# Altium footprint library DSP扩展板.PcbLib: 16 footprints
Each footprint in its own frame and in the unit in brackets; x right, y up, seen from the top. Pads: shape width x height; smd on the part's side, far side on the other; paste and mask are expansions set on the pad; w line width, h text height; cw(c..) or ccw(c..) is an arc to the next point about the centre after c.
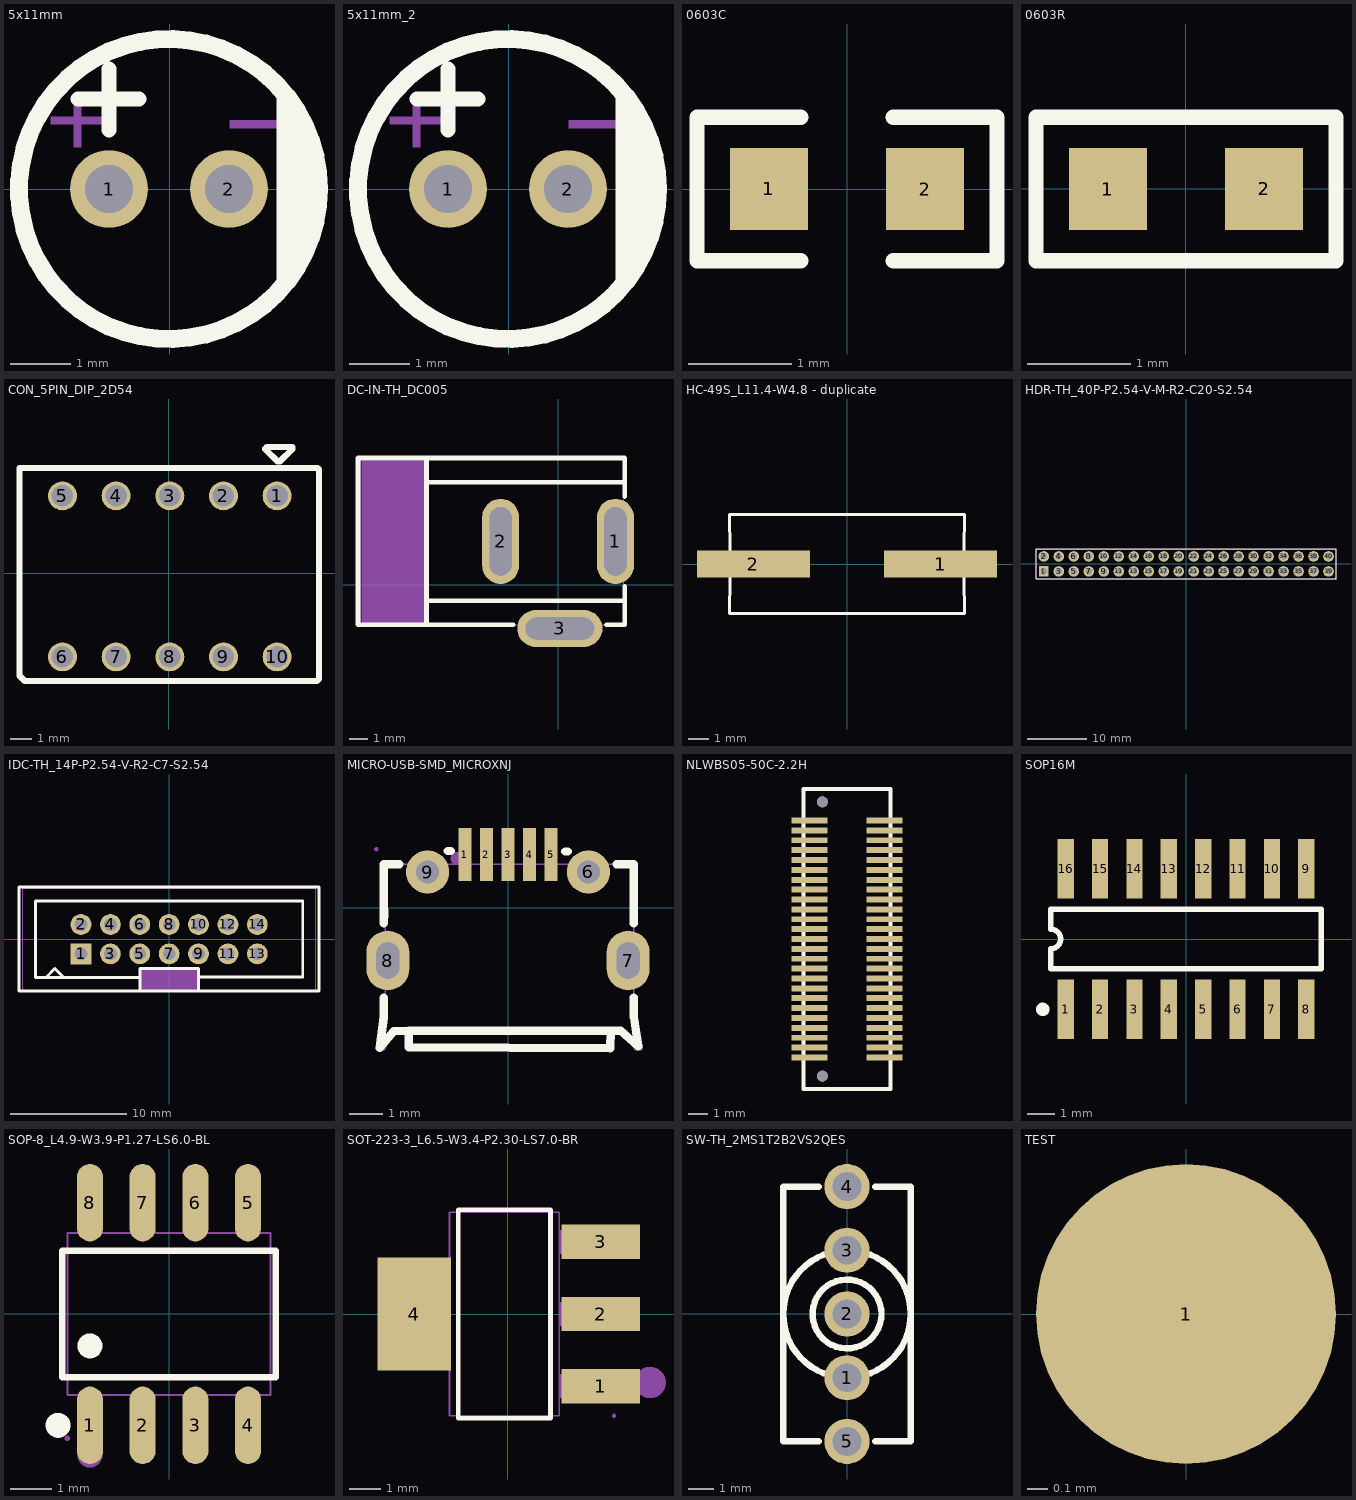
[diagram p0: the footprints below, top view; thin cyan lines are the x and y axes]

## 5x11mm [mm]
height 5.85
pads (2):
  round 1.3 hole 0.8: 1(-1.016,0) 2(0.984,0)
Top Overlay:
  circle w0.3: c-0.016,0 r2.5
  region: 1.778,1.651 1.945,1.491 2.209,1.111 2.391,0.685 2.484,0.231 2.484,-0.231 2.391,-0.685 2.209,-1.111 1.945,-1.491 1.778,-1.651
  lines w0.254: -1.532,1.5 -0.516,1.5 ; -1.016,0.984 -1.016,2
Mechanical 15:
  region: -1.985,1.207 -1.096,1.206 -1.096,1.079 -1.985,1.079
  region: -1.604,0.699 -1.604,1.587 -1.477,1.587 -1.477,0.698
  region: 1,1.143 1.889,1.143 1.889,1.016 1,1.016

## 5x11mm_2 [mm]
pads (2):
  round 1.3 hole 0.8: 1(-1.016,0) 2(0.984,0)
Top Overlay:
  circle w0.3: c-0.016,0 r2.5
  region: 1.778,1.651 1.945,1.491 2.209,1.111 2.391,0.685 2.484,0.231 2.484,-0.231 2.391,-0.685 2.209,-1.111 1.945,-1.491 1.778,-1.651
  lines w0.254: -1.532,1.5 -0.516,1.5 ; -1.016,0.984 -1.016,2
Mechanical 15:
  region: -1.985,1.206 -1.096,1.206 -1.096,1.079 -1.985,1.079
  region: -1.604,0.698 -1.604,1.587 -1.477,1.587 -1.476,0.698
  region: 1,1.143 1.889,1.143 1.889,1.016 1,1.016

## 0603C [mm]
pads (2):
  rect 0.76x0.8 smd: 1(-0.76,0) 2(0.76,0)
Top Overlay:
  lines w0.15: -0.45,-0.7 -1.46,-0.7 -1.46,0.7 -0.45,0.7 ; 0.45,-0.7 1.46,-0.7 1.46,0.7 0.45,0.7

## 0603R [mm]
pads (2):
  rect 0.76x0.8 smd: 1(-0.76,0) 2(0.76,0)
Top Overlay:
  lines w0.15: -1.46,-0.7 -1.46,0.7 1.46,0.7 1.46,-0.7 -1.46,-0.7

## CON_5PIN_DIP_2D54 [mil]
pads (10):
  round 54 hole 40: 1(202,144) 2(102,144) 3(2,144) 4(-98,144) 5(-198,144) 6(-198,-156) 7(-98,-156) 8(2,-156) 9(102,-156) 10(202,-156)
Top Overlay:
  lines w11.8: -278,-191 -268,-201 276,-201 280,-197 280,193 277,196 -278,196 -278,-191 ; 180,231 180,232 183,235 230,235 230,231 207,208 203,208 180,231
  text ".Designator" at 107.13,260 h20
Mechanical 9:
  text "10" at 120,-156 h20
  text "9" at 36,-156 h20
  text "8" at -64,-156 h20
  text "7" at -164,-156 h20
  text "6" at -264,-156 h20
  text "5" at -264,144 h20
  text "3" at -64,144 h20
  text "2" at 36,144 h20
  text "1" at 136,144 h20
  text "4" at -164,144 h20
Mechanical 13:
  lines w1: -279,-197 279,-197 279,197 -279,197 -279,-197

## DC-IN-TH_DC005 [mil]
pads (3):
  oval 78.7x181.1 hole 47.2 slot 145.7 at 90 deg: 1(122,92.5) 2(-122,92.5)
  oval 181.1x78.7 hole 47.2 slot 145.7 at 0 deg: 3(3.9,-92.6)
Top Overlay:
  lines w10: -279.5,-84.7 -279.5,269.7 ; -276.4,-33.5 141.7,-33.5 ; -276.4,218.5 141.7,218.5 ; -95.1,-84.7 -425.2,-84.7 -425.2,269.7 141.7,269.7 141.7,187.9 ; 102.9,-84.7 141.7,-84.7 141.7,-3
Mechanical 2:
  region: -417.3,263.7 -283.5,263.7 -283.5,-82.7 -417.3,-82.7
Mechanical 6:
  lines w2: -419.3,-84.7 -419.3,269.6 139.8,269.6 139.8,-84.7 -419.3,-84.7
Mechanical 7:
  region: -45.3,-100.4 53.1,-100.4 53.1,-82.3 -45.3,-82.3
Mechanical 8:
  region: 142.2,269.6 142.2,268.61 140.79,267.2 138.81,267.2 137.4,268.61 137.4,269.6 137.4,270.59 138.81,272 140.79,272 142.2,270.59 142.2,269.6 142.1,269.6
Mechanical 9:
  region: -114.2,43.3 -129.9,43.3 -129.9,141.7 -114.2,141.7
  region: -45.3,-84.7 53.1,-84.7 53.1,-100.4 -45.3,-100.4
  region: 114.2,141.7 129.9,141.7 129.9,43.3 114.2,43.3

## HC-49S_L11.4-W4.8 - duplicate [mm]
pads (2):
  rect 5.5x1.3 smd: 1(4.553,0) 2(-4.553,0)
Top Overlay:
  lines w0.152: -5.715,-2.413 5.715,-2.413 ; -5.715,-2.413 -5.7,-0.662 -5.715,-2.413 ; -5.715,-2.413 5.715,-2.413 ; -5.715,2.413 -5.7,0.662 -5.715,2.413 ; -5.715,2.413 5.715,2.413 ; -5.715,2.413 5.715,2.413 ; 5.715,-2.413 5.7,-0.662 5.715,-2.413 ; 5.715,2.413 5.7,0.662 5.715,2.413

## HDR-TH_40P-P2.54-V-M-R2-C20-S2.54 [mil]
pads (40):
  rect 62x70.9 hole 43.3: 1(-950,-50)
  round 70.9 hole 43.3: 2(-950,50) 3(-850,-50) 4(-850,50) 5(-750,-50) 6(-750,50) 7(-650,-50) 8(-650,50) 9(-550,-50) 10(-550,50) 11(-450,-50) 12(-450,50) 13(-350,-50) 14(-350,50) 15(-250,-50) 16(-250,50) 17(-150,-50) 18(-150,50) 19(-50,-50) 20(-50,50) 21(50,-50) 22(50,50) 23(150,-50) 24(150,50) 25(250,-50) 26(250,50) 27(350,-50) 28(350,50) 29(450,-50) 30(450,50) 31(550,-50) 32(550,50) 33(650,-50) 34(650,50) 35(750,-50) 36(750,50) 37(850,-50) 38(850,50) 39(950,-50) 40(950,50)
Top Overlay:
  lines w8: -1000,-100 -1000,100 1000,100 1000,-100 -1000,-100
Mechanical 6:
  lines w2: -1000,-98.4 1000,-98.4 1000,98.4 -1000,98.4 -1000,-98.4
Mechanical 8:
  region: -997.6,-98.4 -997.6,-99.39 -999.01,-100.8 -1000.99,-100.8 -1002.4,-99.39 -1002.4,-98.4 -1002.4,-97.41 -1000.99,-96 -999.01,-96 -997.6,-97.41 -997.6,-98.4 -997.7,-98.4
Mechanical 9:
  drawing of 40 lines, arcs and shapes, not listed

## IDC-TH_14P-P2.54-V-R2-C7-S2.54 [mm]
pads (14):
  rect 1.8x1.8 hole 1.1: 1(-7.62,-1.27)
  round 1.8 hole 1.1: 2(-7.62,1.27) 3(-5.08,-1.27) 4(-5.08,1.27) 5(-2.54,-1.27) 6(-2.54,1.27) 7(0,-1.27) 8(0,1.27) 9(2.54,-1.27) 10(2.54,1.27) 11(5.08,-1.27) 12(5.08,1.27) 13(7.62,-1.27) 14(7.62,1.27)
Top Overlay:
  lines w0.254: -12.979,-4.479 -12.979,4.521 ; -12.951,4.521 12.951,4.521 12.951,-4.479 ; -12.926,-4.496 12.951,-4.496 ; -11.557,-3.302 -2.54,-3.302 ; -11.557,-3.277 -11.557,3.293 ; -11.548,3.302 11.548,3.302 ; -10.516,-3.175 -9.881,-2.54 -9.195,-3.226 -9.195,-3.251 ; -2.518,-4.496 -2.518,-2.54 2.54,-2.54 2.54,-4.496 ; 2.54,-3.277 11.548,-3.277 11.548,3.293
Mechanical 6:
  region: -2.5,-4.4 -2.5,-2.5 2.6,-2.5 2.6,-4.4
Mechanical 15:
  region: 7.3,1.59 7.94,1.59 7.94,0.95 7.3,0.95
  region: 7.3,-0.95 7.94,-0.95 7.94,-1.59 7.3,-1.59
  region: 4.76,1.59 5.4,1.59 5.4,0.95 4.76,0.95
  region: 4.76,-0.95 5.4,-0.95 5.4,-1.59 4.76,-1.59
  region: 2.22,1.59 2.86,1.59 2.86,0.95 2.22,0.95
  region: 2.22,-0.95 2.86,-0.95 2.86,-1.59 2.22,-1.59
  region: -0.32,1.59 0.32,1.59 0.32,0.95 -0.32,0.95
  region: -0.32,-0.95 0.32,-0.95 0.32,-1.59 -0.32,-1.59
  region: -2.86,1.59 -2.22,1.59 -2.22,0.95 -2.86,0.95
  region: -2.86,-0.95 -2.22,-0.95 -2.22,-1.59 -2.86,-1.59
  region: -5.4,1.59 -4.76,1.59 -4.76,0.95 -5.4,0.95
  region: -5.4,-0.95 -4.76,-0.95 -4.76,-1.59 -5.4,-1.59
  region: -7.94,1.59 -7.3,1.59 -7.3,0.95 -7.94,0.95
  region: -7.94,-0.95 -7.3,-0.95 -7.3,-1.59 -7.94,-1.59
  region: -12.59,-4.4 -12.59,-4.425 -12.625,-4.46 -12.675,-4.46 -12.71,-4.425 -12.71,-4.4 -12.71,-4.375 -12.675,-4.34 -12.625,-4.34 -12.59,-4.375 -12.59,-4.4
  lines w0.051: -12.65,-4.4 12.65,-4.4 12.65,4.4 -12.65,4.4 -12.65,-4.4

## MICRO-USB-SMD_MICROXNJ [mm]
pads (9):
  rect 0.4x1.6 smd paste-100 mask+0.051: 1(-1.3,1.596) 2(-0.65,1.596) 3(0,1.596) 4(0.65,1.596) 5(1.3,1.596)
  round 1.3 hole 0.7: 6(2.425,1.074) 9(-2.425,1.074)
  oval 1.3x1.8 hole 0.7 slot 1.1 at 90 deg: 7(3.625,-1.596) 8(-3.625,-1.596)
Top Overlay:
  lines w0.254: -3.745,-2.719 -3.745,-3.315 -3.87,-4.23 -3.45,-3.735 -3,-3.715 ; -3.745,-0.473 -3.745,1.31 -3.274,1.31 ; -3.735,-0.276 -3.731,-0.068 ; -3.733,-0.275 -3.732,-0.101 ; -1.814,1.707 -1.731,1.707 ; 1.731,1.693 1.799,1.693 ; 3.274,1.31 3.79,1.31 3.79,-0.481 ; 3.79,-3.304 3.79,-2.712 ; 3.8,-3.304 3.93,-4.19 3.4,-3.715 3.1,-3.715 ; -3,-3.715 -3,-4.215 3.09,-4.245 3.1,-3.715 ; -3,-3.715 3.1,-3.715
Top Paste:
  drawing of 9 lines, arcs and shapes, not listed
Mechanical 6:
  circle w0.2: c-1.53,1.479 r0.1
Mechanical 15:
  region: 1.175,0.966 1.175,1.966 1.425,1.966 1.425,0.966
  region: 0.525,0.966 0.525,1.966 0.775,1.966 0.775,0.966
  region: -0.125,0.966 -0.125,1.966 0.125,1.966 0.125,0.966
  region: -0.775,0.966 -0.775,1.966 -0.525,1.966 -0.525,0.966
  region: -1.425,0.966 -1.425,1.966 -1.175,1.966 -1.175,0.966
  region: 2.175,0.974 2.175,1.174 2.675,1.174 2.675,0.974
  region: -2.675,0.974 -2.675,1.174 -2.175,1.174 -2.175,0.974
  region: 3.475,-1.141 3.775,-1.141 3.775,-2.051 3.475,-2.051
  region: -3.775,-1.141 -3.475,-1.141 -3.475,-2.051 -3.775,-2.051
  region: -3.91,1.766 -3.91,1.791 -3.945,1.826 -3.995,1.826 -4.03,1.791 -4.03,1.766 -4.03,1.741 -3.995,1.706 -3.945,1.706 -3.91,1.741
  lines w0.051: -3.97,-4.281 -3.7,-3.681 -3.7,1.299 -3.7,1.309 3.79,1.309 3.79,-3.671 4.05,-4.221 4.03,-4.281 3.83,-4.281 3.54,-3.691 3.15,-3.691 3.15,-4.291 -3.03,-4.281 -3.05,-4.281 -3.05,-3.691 -3.45,-3.691 -3.74,-4.291 -3.97,-4.281

## NLWBS05-50C-2.2H [mil]
pads (52):
  rect 70.9x11.8 smd: 1(10798.2,21632.2) 2(10947.8,21632.2) 3(10798.2,21612.5) 4(10947.8,21612.5) 5(10798.2,21592.9) 6(10947.8,21592.9) 7(10798.2,21573.2) 8(10947.8,21573.2) 9(10798.2,21553.5) 10(10947.8,21553.5) 11(10798.2,21533.8) 12(10947.8,21533.8) 13(10798.2,21514.1) 14(10947.8,21514.1) 15(10798.2,21494.4) 16(10947.8,21494.4) 17(10798.2,21474.7) 18(10947.8,21474.7) 19(10798.2,21455.1) 20(10947.8,21455.1) 21(10798.2,21435.4) 22(10947.8,21435.4) 23(10798.2,21415.7) 24(10947.8,21415.7) 25(10798.2,21396) 26(10947.8,21396) 27(10798.2,21376.3) 28(10947.8,21376.3) 29(10798.2,21356.6) 30(10947.8,21356.6) 31(10798.2,21336.9) 32(10947.8,21336.9) 33(10798.2,21317.3) 34(10947.8,21317.3) 35(10798.2,21297.6) 36(10947.8,21297.6) 37(10798.2,21277.9) 38(10947.8,21277.9) 39(10798.2,21258.2) 40(10947.8,21258.2) 41(10798.2,21238.5) 42(10947.8,21238.5) 43(10798.2,21218.8) 44(10947.8,21218.8) 45(10798.2,21199.1) 46(10947.8,21199.1) 47(10798.2,21179.5) 48(10947.8,21179.5) 49(10798.2,21159.8) 50(10947.8,21159.8)
  round 21.7 hole 21.7: " "(10823.8,21122.4) " "(10823.8,21669.6)
Top Overlay:
  lines w7.9: 10786.4,21096.8 10786.4,21695.2 10959.6,21695.2 10959.6,21096.8 10786.4,21096.8

## SOP16M [mm]
pads (16):
  rect 0.6x2.2 smd: 1(-4.445,-2.6) 2(-3.175,-2.6) 3(-1.905,-2.6) 4(-0.635,-2.6) 5(0.635,-2.6) 6(1.905,-2.6) 7(3.175,-2.6) 8(4.445,-2.6) 9(4.445,2.6) 10(3.175,2.6) 11(1.905,2.6) 12(0.635,2.6) 13(-0.635,2.6) 14(-1.905,2.6) 15(-3.175,2.6) 16(-4.445,2.6)
Top Overlay:
  circle w0.25: c-5.295,-2.6 r0.125
  lines w0.2: -5,-1.1 -5,-0.367 ccw(c-5,0) -5,0.367 -5,1.1 5,1.1 5,-1.1 -5,-1.1

## SOP-8_L4.9-W3.9-P1.27-LS6.0-BL [mm]
pads (8):
  oval 0.63x1.865 smd paste+0 mask+0.051: 1(-1.905,-2.682) 2(-0.635,-2.682) 3(0.635,-2.682) 4(1.905,-2.682) 5(1.905,2.682) 6(0.635,2.682) 7(-0.635,2.682) 8(-1.905,2.682)
Top Overlay:
  circle w0.3: c-1.905,-0.769 r0.15
  circle w0.3: c-2.672,-2.682 r0.15
  lines w0.152: -2.576,-1.521 -2.576,1.521 2.576,1.521 2.576,-1.521 -2.576,-1.521
Mechanical 6:
  circle w0.3: c-1.905,-3.4 r0.15
Mechanical 15:
  region: 1.695,1.94 1.695,2.175 2.115,2.175 2.115,1.94
  region: 1.695,2.165 1.695,3 2.115,3 2.115,2.165
  region: 0.425,1.94 0.425,2.175 0.845,2.175 0.845,1.94
  region: 0.425,2.165 0.425,3 0.845,3 0.845,2.165
  region: -0.845,1.94 -0.845,2.175 -0.425,2.175 -0.425,1.94
  region: -0.845,2.165 -0.845,3 -0.425,3 -0.425,2.165
  region: -2.115,1.94 -2.115,2.175 -1.695,2.175 -1.695,1.94
  region: -2.115,2.165 -2.115,3 -1.695,3 -1.695,2.165
  region: 1.695,-2.175 1.695,-1.94 2.115,-1.94 2.115,-2.175
  region: 1.695,-3 1.695,-2.165 2.115,-2.165 2.115,-3
  region: 0.425,-2.175 0.425,-1.94 0.845,-1.94 0.845,-2.175
  region: 0.425,-3 0.425,-2.165 0.845,-2.165 0.845,-3
  region: -0.845,-2.175 -0.845,-1.94 -0.425,-1.94 -0.425,-2.175
  region: -0.845,-3 -0.845,-2.165 -0.425,-2.165 -0.425,-3
  region: -2.115,-2.175 -2.115,-1.94 -1.695,-1.94 -1.695,-2.175
  region: -2.115,-3 -2.115,-2.165 -1.695,-2.165 -1.695,-3
  region: -2.39,-3 -2.39,-2.975 -2.425,-2.94 -2.475,-2.94 -2.51,-2.975 -2.51,-3 -2.51,-3.025 -2.475,-3.06 -2.425,-3.06 -2.39,-3.025 -2.39,-3
  lines w0.051: -2.45,-1.95 -2.45,1.95 2.45,1.95 2.45,-1.95 -2.45,-1.95

## SOT-223-3_L6.5-W3.4-P2.30-LS7.0-BR [mm]
pads (4):
  rect 2.5x1.1 smd: 1(2.97,-2.3) 2(2.97,0) 3(2.97,2.3)
  rect 2.34x3.6 smd: 4(-2.97,0)
Top Overlay:
  lines w0.152: -1.571,-3.326 1.371,-3.326 1.371,3.326 -1.571,3.326 -1.571,-3.326
Mechanical 6:
  circle w0.5: c4.552,-2.188 r0.25
Mechanical 15:
  region: -3.6,-1.5 -3.6,1.5 -2.85,1.5 -2.85,-1.5
  region: -2.86,-1.5 -2.86,1.5 -1.84,1.5 -1.84,-1.5
  region: 2.65,-2.675 2.65,-1.925 3.4,-1.925 3.4,-2.675
  region: 1.64,-2.675 1.64,-1.925 2.66,-1.925 2.66,-2.675
  region: 2.65,-0.375 2.65,0.375 3.4,0.375 3.4,-0.375
  region: 1.64,-0.375 1.64,0.375 2.66,0.375 2.66,-0.375
  region: 2.65,1.925 2.65,2.675 3.4,2.675 3.4,1.925
  region: 1.64,1.925 1.64,2.675 2.66,2.675 2.66,1.925
  region: 3.46,-3.25 3.46,-3.225 3.425,-3.19 3.375,-3.19 3.34,-3.225 3.34,-3.25 3.34,-3.275 3.375,-3.31 3.425,-3.31 3.46,-3.275
  lines w0.051: -1.85,-3.25 1.65,-3.25 1.65,3.25 -1.85,3.25 -1.85,-3.25

## SW-TH_2MS1T2B2VS2QES [mm]
height 0.35
pads (5):
  round 1.8 hole 1.15: 1(0,-2.54) 2(0,0) 3(0,2.54) 4(0,5.08) 5(0,-5.08)
Top Overlay:
  circle w0.254: c0,0 r2.541
  circle w0.254: c0,0 r1.374
  lines w0.254: -2.54,4.953 -2.54,-5.08 -1.131,-5.08 ; -2.54,5.08 -1.131,5.08 ; 1.131,-5.08 2.54,-5.08 2.54,5.08 1.131,5.08

## TEST [mm]
pads (1):
  round 1.5 smd: 1(0,0)